# Altium schematic symbol library 10K resister 0805.SchLib: 1 symbol
Pins are listed as number, name and electrical type; pins without a type are passive.

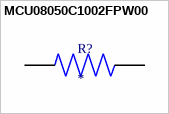
[diagram p0: symbol MCU08050C1002FPW00]

## MCU08050C1002FPW00
designator R?
Res Thin Film 0805 10K Ohm 1% 0.125W(1/8W) Â±50ppm/Â°C Sulfur Resistant Pad SMD Automotive Medical T/R; MF: Vishay; MP: MCU08050C1002FPW00; SnapEDA_Link: https://www.snapeda.com/parts/MCU08050C1002FPW00/Vishay/view-part/?ref=snap; Package: 2012 Vishay; Value: *; Check_prices: https://www.snapeda.com/parts/MCU08050C1002FPW00/Vishay/view-part/?ref=eda
footprint RESC2012X55N
pins: 1, 2